# Altium footprint library LED_XPGDWT-B1-0000-00LE1.PcbLib: 1 footprints
Each footprint in its own frame and in the unit in brackets; x right, y up, seen from the top. Pads: shape width x height; smd on the part's side, far side on the other; paste and mask are expansions set on the pad; w line width, h text height; cw(c..) or ccw(c..) is an arc to the next point about the centre after c.
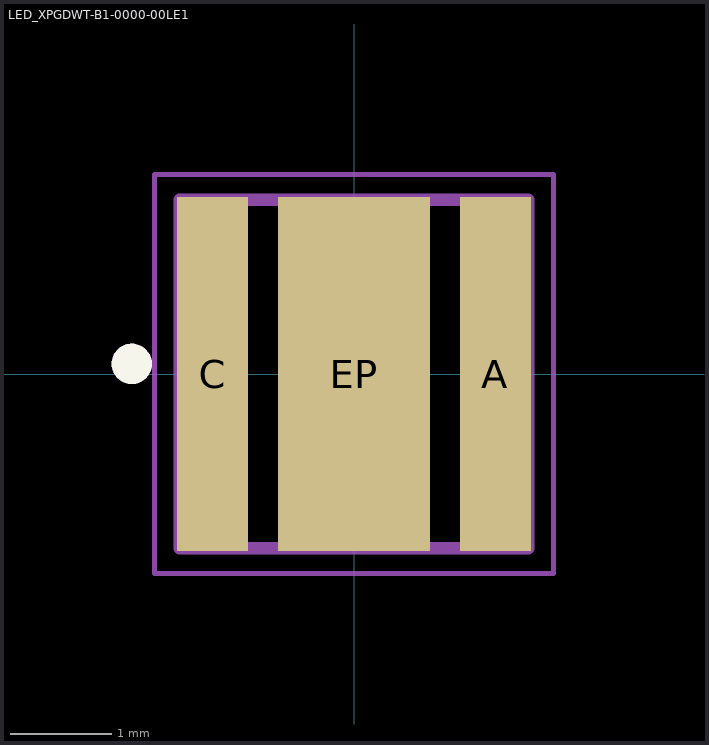
[diagram p0: the footprint, top view; thin cyan lines are the x and y axes]

## LED_XPGDWT-B1-0000-00LE1 [mm]
height 2.26
pads (3):
  rect 0.7x3.5 smd paste-3 mask-0.1: A(1.4,0) C(-1.4,0)
  rect 1.5x3.5 smd paste-3 mask-0.1: EP(0,0)
Top Overlay:
  circle w0.2: c-2.2,0.1 r0.1
Top Paste:
  region: -1.15,1.22 -1.65,1.22 -1.65,1.65 -1.15,1.65
  region: 1.65,1.22 1.15,1.22 1.15,1.65 1.65,1.65
  region: -1.15,0.5 -1.65,0.5 -1.65,0.93 -1.15,0.93
  region: -1.15,-0.215 -1.65,-0.215 -1.65,0.215 -1.15,0.215
  region: -1.15,-0.933 -1.65,-0.933 -1.65,-0.503 -1.15,-0.503
  region: -1.15,-1.651 -1.65,-1.651 -1.65,-1.221 -1.15,-1.221
  region: 1.65,0.5 1.15,0.5 1.15,0.93 1.65,0.93
  region: 1.65,-0.215 1.15,-0.215 1.15,0.215 1.65,0.215
  region: -1.15,-0.933 -1.65,-0.933 -1.65,-0.503 -1.15,-0.503
  region: 1.65,-0.933 1.15,-0.933 1.15,-0.503 1.65,-0.503
  region: 1.65,-1.651 1.15,-1.651 1.15,-1.221 1.65,-1.221
  region: -0.095,0.64 -0.655,0.64 -0.655,1.47 -0.095,1.47
  region: -0.095,-0.1 -0.655,-0.1 -0.655,0.46 -0.095,0.46
  region: -0.095,-0.84 -0.655,-0.84 -0.655,-0.28 -0.095,-0.28
  region: -0.095,-1.58 -0.655,-1.58 -0.655,-1.02 -0.095,-1.02
  region: 0.655,-1.47 0.095,-1.47 0.095,-0.64 0.655,-0.64
  region: 0.655,-0.46 0.095,-0.46 0.095,0.1 0.655,0.1
  region: 0.655,0.28 0.095,0.28 0.095,0.84 0.655,0.84
  region: 0.655,1.02 0.095,1.02 0.095,1.58 0.655,1.58
Assembly Top:
  circle w0.2: c-2.2,0.1 r0.1
  lines w0.127: -1.725,-1.725 1.725,-1.725 1.725,1.725 -1.725,1.725 -1.725,-1.725
Courtyard Top:
  lines w0.05: -1.975,-1.975 1.975,-1.975 1.975,1.975 -1.975,1.975 -1.975,-1.975
3D body "step_temp.STEP": height 2.26, standoff 0, extent -1.725,-1.725 1.725,1.725